# EAGLE library part 6130XX243121_613032243121 (library WR-PHD)
WR-PHD 2.54 mm Angled Dual Socket Header Article Properties Pins 4; 6; 8; 10; 12; 14; 16; 20; 22; 24; 26; 32; 34; 40; 64; 72 Material Properties Insulator Material PBT Insulator Flammability Rating UL94 V-0 Contact Material Copper Alloy Contact Plating Gold Contact Type Stamped General Information Operating Temperature -40 °C up to +105 °C Compliance Lead free / RoHS Pitch 2.54 mm Durability 25 Mating cycles Rows Dual Gender Socket Header Type Angled Electrical Properties Withstanding Voltage 500 V (AC) Contact Resistance 20 mΩ RISO 1000 MΩ CERTIFICATION UL Approval E323964 Packaging Properties Packaging Tray <https://www.we-online.com/components/media/o33216v209%20Family_WR-PHD_6130xx243121.jpg> Details see: www.we-online.com/en/components/products/PHD_2_54_ANGLED_DUAL_SOCKET_HEADER_6130XX243121 <www.we-online.com/catalog/PHD_2_54_ANGLED_DUAL_SOCKET_HEADER_6130XX243121/?utm_source=eagle_model&utm_medium=description_link&utm_campaign=eisos_eagle> Updated by Ella 2024-03-13 2024 (C) Würth Elektronik
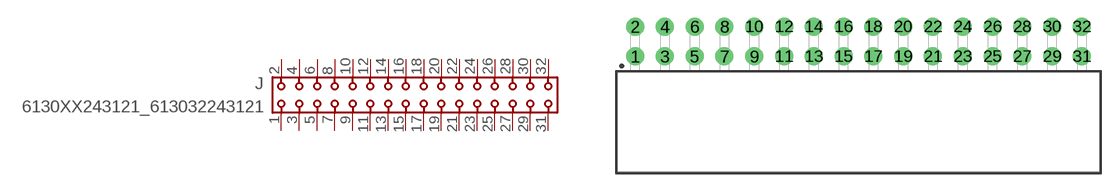
[diagram p155: symbol with the pads of 613032243121; footprint 613032243121]

Designator prefix J

## 6130XX243121_613032243121 (DATASHEET-URL: https://www.we-online.com/redexpert/spec/613032243121?ae; GENDER: Socket Header; IR: 3A; MOUNT: THT; PACKAGING: Tray; PART-NUMBER: 613032243121; PINS: 32; PITCH: 2.54 mm; ROWS: Dual; TYPE: Angled; VALUE: 613032243121)  [613032243121]
1  1  pas
2  2  pas
3  3  pas
4  4  pas
5  5  pas
6  6  pas
7  7  pas
8  8  pas
9  9  pas
10  10  pas
11  11  pas
12  12  pas
13  13  pas
14  14  pas
15  15  pas
16  16  pas
17  17  pas
18  18  pas
19  19  pas
20  20  pas
21  21  pas
22  22  pas
23  23  pas
24  24  pas
25  25  pas
26  26  pas
27  27  pas
28  28  pas
29  29  pas
30  30  pas
31  31  pas
32  32  pas

## Footprint 613032243121 (pad centres in mm)
WR-PHD 2.54 mm Angled Socket Header, 32 Pins
drill 1.02: 1 -19.05,5.61; 2 -19.05,8.15; 3 -16.51,5.61; 4 -16.51,8.15; 5 -13.97,5.61; 6 -13.97,8.15; 7 -11.43,5.61; 8 -11.43,8.15; 9 -8.89,5.61; 10 -8.89,8.15; 11 -6.35,5.61; 12 -6.35,8.15; 13 -3.81,5.61; 14 -3.81,8.15; 15 -1.27,5.61; 16 -1.27,8.15; 17 1.27,5.61; 18 1.27,8.15; 19 3.81,5.61; 20 3.81,8.15; 21 6.35,5.61; 22 6.35,8.15; 23 8.89,5.61; 24 8.89,8.15; 25 11.43,5.61; 26 11.43,8.15; 27 13.97,5.61; 28 13.97,8.15; 29 16.51,5.61; 30 16.51,8.15; 31 19.05,5.61; 32 19.05,8.15